# Altium footprint library MICROCHIP_PKG_SOIC-8(C04-2057-SN).PcbLib: 1 footprints
Each footprint in its own frame and in the unit in brackets; x right, y up, seen from the top. Pads: shape width x height; smd on the part's side, far side on the other; paste and mask are expansions set on the pad; w line width, h text height; cw(c..) or ccw(c..) is an arc to the next point about the centre after c.
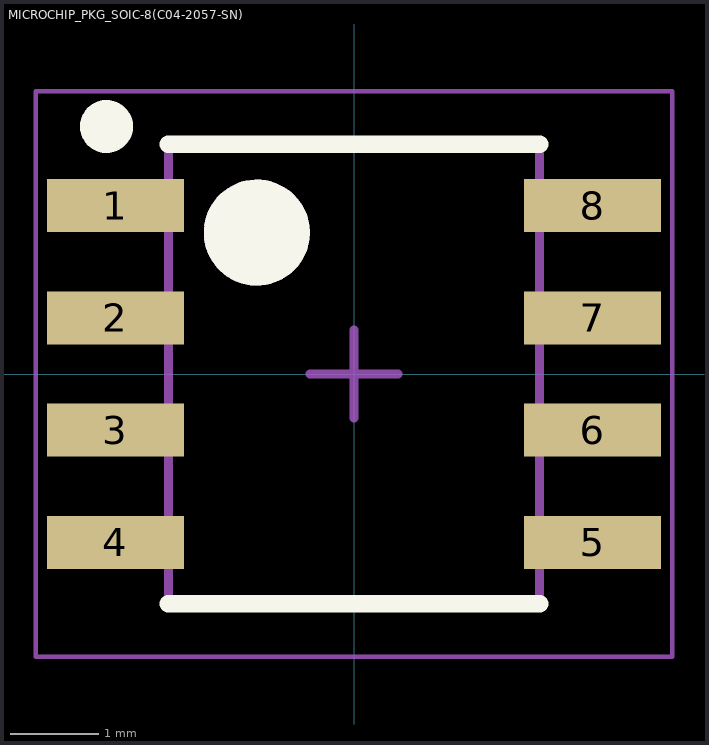
[diagram p0: the footprint, top view; thin cyan lines are the x and y axes]

## MICROCHIP_PKG_SOIC-8(C04-2057-SN) [mm]
height 2
pads (8):
  rect 1.55x0.6 smd: 1(-2.7,1.905) 2(-2.7,0.635) 3(-2.7,-0.635) 4(-2.7,-1.905) 5(2.7,-1.905) 6(2.7,-0.635) 7(2.7,0.635) 8(2.7,1.905)
Top Overlay:
  circle w0.6: c-1.1,1.6 r0.3
  circle w0.3: c-2.8,2.8 r0.15
  lines w0.2: -2.1,-2.6 2.1,-2.6 ; -2.1,2.6 2.1,2.6
Mechanical 13:
  circle w0.6: c-1.1,1.6 r0.3
  lines w0.1: -2.1,-2.6 -2.1,2.6 2.1,2.6 2.1,-2.6 -2.1,-2.6
Mechanical 15:
  lines w0.05: -3.6,-3.2 -3.6,3.2 3.6,3.2 3.6,-3.2 -3.6,-3.2
  lines w0.1: -0.5,0 0.5,0 ; 0,-0.5 0,0.5
3D body: height 1.75, standoff 0, extent -2.1,-2.6 2.1,2.6